# Altium footprint library Package_DFN_QFN.PcbLib: 735 footprints (part 27 of 46)
Each footprint in its own frame and in the unit in brackets; x right, y up, seen from the top. Pads: shape width x height; smd on the part's side, far side on the other; paste and mask are expansions set on the pad; w line width, h text height; cw(c..) or ccw(c..) is an arc to the next point about the centre after c.
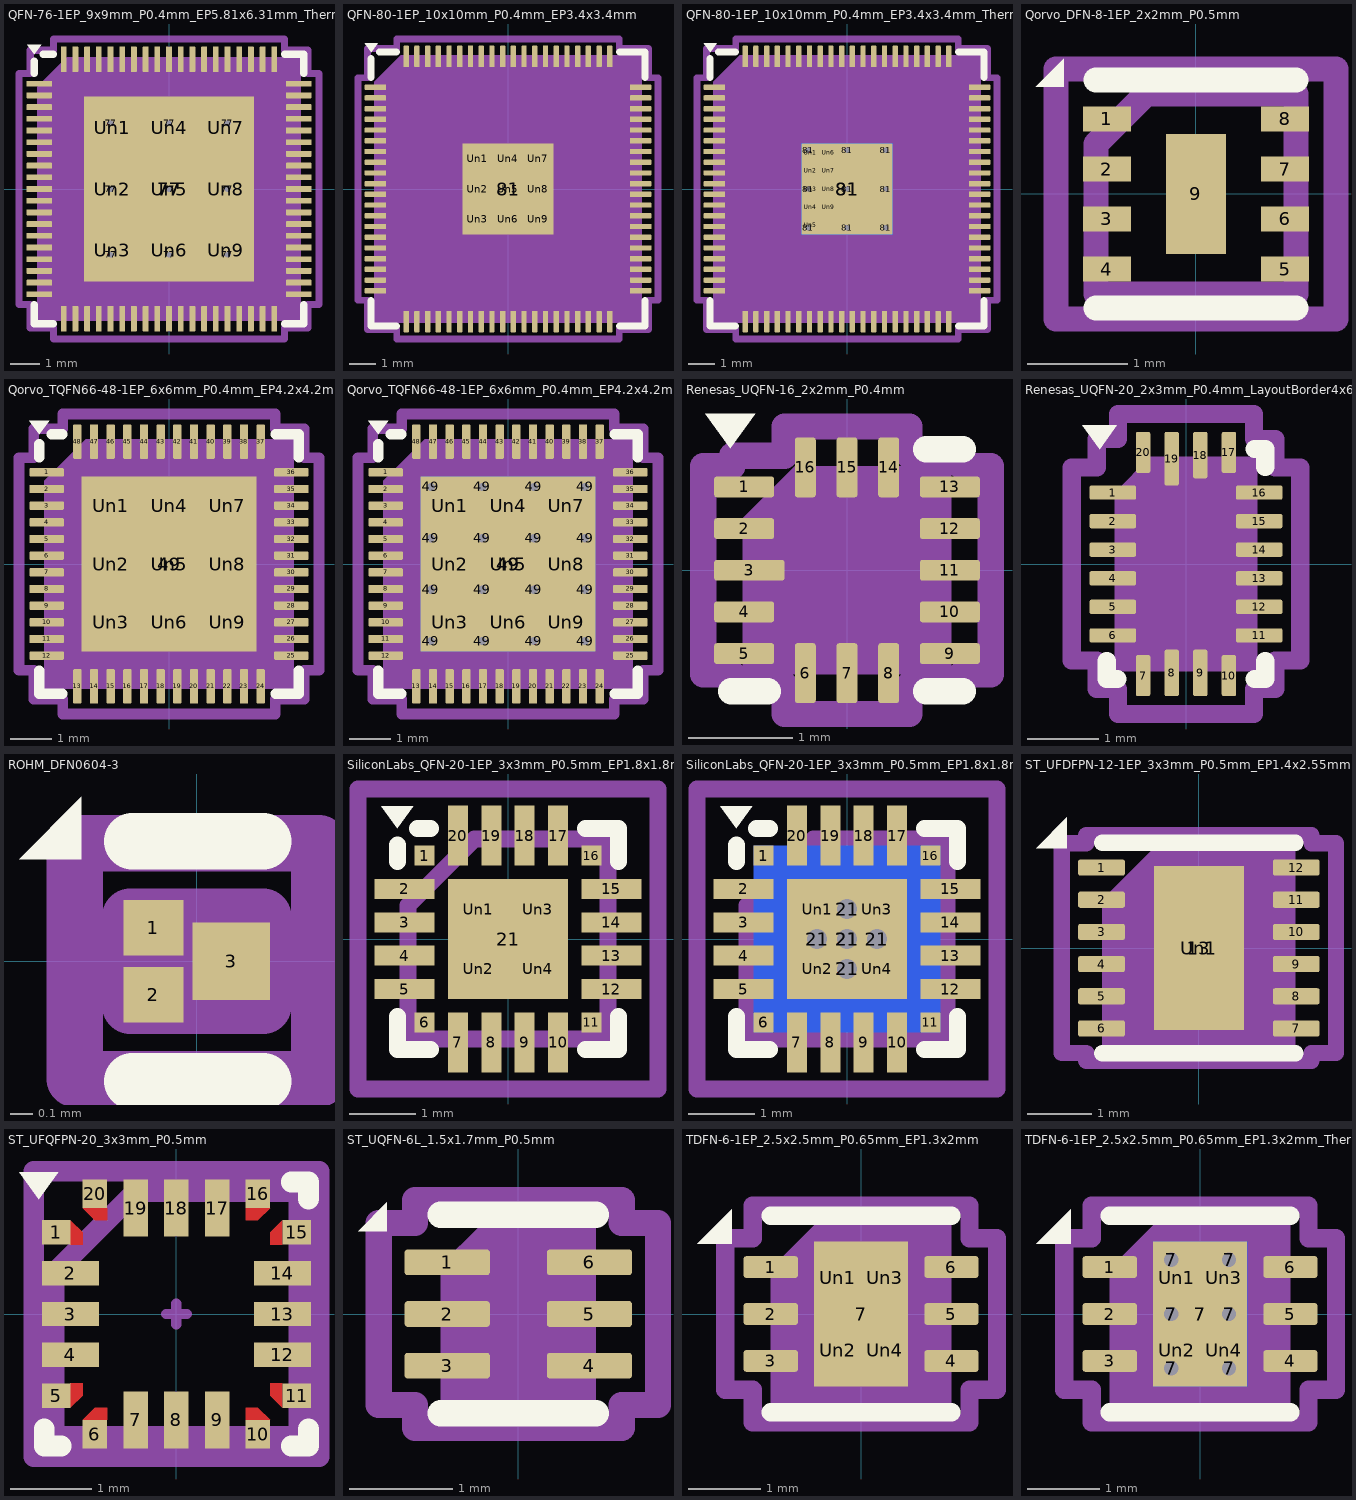
[diagram p26: the footprints below, top view; thin cyan lines are the x and y axes]

## QFN-76-1EP_9x9mm_P0.4mm_EP5.81x6.31mm_ThermalVias [mm] "QFN-76-1EP_9x9mm_P0.4mm_EP5.81x6.31mm_ThermalVias"
pads (96):
  rrect25% 0.875x0.2 smd: 1(-4.437,3.6) 2(-4.437,3.2) 3(-4.437,2.8) 4(-4.437,2.4) 5(-4.437,2) 6(-4.437,1.6) 7(-4.437,1.2) 8(-4.437,0.8) 9(-4.437,0.4) 10(-4.437,0) 11(-4.437,-0.4) 12(-4.437,-0.8) 13(-4.437,-1.2) 14(-4.437,-1.6) 15(-4.437,-2) 16(-4.437,-2.4) 17(-4.437,-2.8) 18(-4.437,-3.2) 19(-4.437,-3.6) 39(4.437,-3.6) 40(4.437,-3.2) 41(4.437,-2.8) 42(4.437,-2.4) 43(4.437,-2) 44(4.437,-1.6) 45(4.437,-1.2) 46(4.437,-0.8) 47(4.437,-0.4) 48(4.437,0) 49(4.437,0.4) 50(4.437,0.8) 51(4.437,1.2) 52(4.437,1.6) 53(4.437,2) 54(4.437,2.4) 55(4.437,2.8) 56(4.437,3.2) 57(4.437,3.6)
  rrect25% 0.2x0.875 smd: 20(-3.6,-4.437) 21(-3.2,-4.437) 22(-2.8,-4.437) 23(-2.4,-4.437) 24(-2,-4.437) 25(-1.6,-4.437) 26(-1.2,-4.437) 27(-0.8,-4.437) 28(-0.4,-4.437) 29(0,-4.437) 30(0.4,-4.437) 31(0.8,-4.437) 32(1.2,-4.437) 33(1.6,-4.437) 34(2,-4.437) 35(2.4,-4.437) 36(2.8,-4.437) 37(3.2,-4.437) 38(3.6,-4.437) 58(3.6,4.437) 59(3.2,4.437) 60(2.8,4.437) 61(2.4,4.437) 62(2,4.437) 63(1.6,4.437) 64(1.2,4.437) 65(0.8,4.437) 66(0.4,4.437) 67(0,4.437) 68(-0.4,4.437) 69(-0.8,4.437) 70(-1.2,4.437) 71(-1.6,4.437) 72(-2,4.437) 73(-2.4,4.437) 74(-2.8,4.437) 75(-3.2,4.437) 76(-3.6,4.437)
  round 0.5 hole 0.2: 77(-2,-2.25) 77(-2,0) 77(-2,2.25) 77(0,-2.25) 77(0,0) 77(0,2.25) 77(2,-2.25) 77(2,0) 77(2,2.25)
  rect 5.81x6.31 smd: 77(0,0)
  rect 4.5x5 smd far side: 77(0,0)
  rrect16% 1.56x1.7 on Top Paste: Un1(-1.94,2.1) Un2(-1.94,0) Un3(-1.94,-2.1) Un4(0,2.1) Un5(0,0) Un6(0,-2.1) Un7(1.94,2.1) Un8(1.94,0) Un9(1.94,-2.1)
F.SilkS:
  region: -4.61,4.61 -4.85,4.94 -4.37,4.94
  lines w0.254: -4.61,-3.96 -4.61,-4.61 -3.96,-4.61 ; -4.61,3.96 -4.61,4.37 ; -4.31,4.61 -3.96,4.61 ; 3.96,-4.61 4.61,-4.61 4.61,-3.96 ; 3.96,4.61 4.61,4.61 4.61,3.96
Top Component Center:
  lines w0.127: -0.127,0 0.127,0 -0.127,0 ; 0,-0.127 0,0.127 0,-0.127
Top Assembly:
  region: 4.5,-4.5 -4.5,-4.5 -4.5,3.5 -3.5,4.5 4.5,4.5
Top Courtyard:
  lines w0.254: -5.13,-3.95 -5.13,3.95 -4.75,3.95 -4.75,4.75 -3.95,4.75 -3.95,5.13 3.95,5.13 3.95,4.75 4.75,4.75 4.75,3.95 5.13,3.95 5.13,-3.95 4.75,-3.95 4.75,-4.75 3.95,-4.75 3.95,-5.13 -3.95,-5.13 -3.95,-4.75 -4.75,-4.75 -4.75,-3.95 -5.13,-3.95
Top Designator:
  text ".Designator" at -3.43,-0.344 h1.52
3D body "QFN-76-1EP_9x9mm_P0.4mm_EP5.81x6.31mm.step": height 0.88, standoff 0, extent -4.5,-4.5 4.5,4.5

## QFN-80-1EP_10x10mm_P0.4mm_EP3.4x3.4mm [mm] "QFN-80-1EP_10x10mm_P0.4mm_EP3.4x3.4mm"
pads (90):
  rrect25% 0.8x0.2 smd: 1(-4.95,3.8) 2(-4.95,3.4) 3(-4.95,3) 4(-4.95,2.6) 5(-4.95,2.2) 6(-4.95,1.8) 7(-4.95,1.4) 8(-4.95,1) 9(-4.95,0.6) 10(-4.95,0.2) 11(-4.95,-0.2) 12(-4.95,-0.6) 13(-4.95,-1) 14(-4.95,-1.4) 15(-4.95,-1.8) 16(-4.95,-2.2) 17(-4.95,-2.6) 18(-4.95,-3) 19(-4.95,-3.4) 20(-4.95,-3.8) 41(4.95,-3.8) 42(4.95,-3.4) 43(4.95,-3) 44(4.95,-2.6) 45(4.95,-2.2) 46(4.95,-1.8) 47(4.95,-1.4) 48(4.95,-1) 49(4.95,-0.6) 50(4.95,-0.2) 51(4.95,0.2) 52(4.95,0.6) 53(4.95,1) 54(4.95,1.4) 55(4.95,1.8) 56(4.95,2.2) 57(4.95,2.6) 58(4.95,3) 59(4.95,3.4) 60(4.95,3.8)
  rrect25% 0.2x0.8 smd: 21(-3.8,-4.95) 22(-3.4,-4.95) 23(-3,-4.95) 24(-2.6,-4.95) 25(-2.2,-4.95) 26(-1.8,-4.95) 27(-1.4,-4.95) 28(-1,-4.95) 29(-0.6,-4.95) 30(-0.2,-4.95) 31(0.2,-4.95) 32(0.6,-4.95) 33(1,-4.95) 34(1.4,-4.95) 35(1.8,-4.95) 36(2.2,-4.95) 37(2.6,-4.95) 38(3,-4.95) 39(3.4,-4.95) 40(3.8,-4.95) 61(3.8,4.95) 62(3.4,4.95) 63(3,4.95) 64(2.6,4.95) 65(2.2,4.95) 66(1.8,4.95) 67(1.4,4.95) 68(1,4.95) 69(0.6,4.95) 70(0.2,4.95) 71(-0.2,4.95) 72(-0.6,4.95) 73(-1,4.95) 74(-1.4,4.95) 75(-1.8,4.95) 76(-2.2,4.95) 77(-2.6,4.95) 78(-3,4.95) 79(-3.4,4.95) 80(-3.8,4.95)
  rect 3.4x3.4 smd: 81(0,0)
  rrect25% 0.91x0.91 on Top Paste: Un1(-1.13,1.13) Un2(-1.13,0) Un3(-1.13,-1.13) Un4(0,1.13) Un5(0,0) Un6(0,-1.13) Un7(1.13,1.13) Un8(1.13,0) Un9(1.13,-1.13)
F.SilkS:
  region: -5.11,5.11 -5.35,5.44 -4.87,5.44
  lines w0.254: -5.11,-4.16 -5.11,-5.11 -4.16,-5.11 ; -5.11,4.16 -5.11,4.87 ; -4.81,5.11 -4.16,5.11 ; 4.16,-5.11 5.11,-5.11 5.11,-4.16 ; 4.16,5.11 5.11,5.11 5.11,4.16
Top Component Center:
  lines w0.127: -0.127,0 0.127,0 -0.127,0 ; 0,-0.127 0,0.127 0,-0.127
Top Assembly:
  region: 5,-5 -5,-5 -5,4 -4,5 5,5
Top Courtyard:
  lines w0.254: -5.6,-4.15 -5.6,4.15 -5.25,4.15 -5.25,5.25 -4.15,5.25 -4.15,5.6 4.15,5.6 4.15,5.25 5.25,5.25 5.25,4.15 5.6,4.15 5.6,-4.15 5.25,-4.15 5.25,-5.25 4.15,-5.25 4.15,-5.6 -4.15,-5.6 -4.15,-5.25 -5.25,-5.25 -5.25,-4.15 -5.6,-4.15
Top Designator:
  text ".Designator" at -3.43,-0.344 h1.52

## QFN-80-1EP_10x10mm_P0.4mm_EP3.4x3.4mm_ThermalVias [mm] "QFN-80-1EP_10x10mm_P0.4mm_EP3.4x3.4mm_ThermalVias"
pads (116):
  rrect25% 0.8x0.2 smd: 1(-4.95,3.8) 2(-4.95,3.4) 3(-4.95,3) 4(-4.95,2.6) 5(-4.95,2.2) 6(-4.95,1.8) 7(-4.95,1.4) 8(-4.95,1) 9(-4.95,0.6) 10(-4.95,0.2) 11(-4.95,-0.2) 12(-4.95,-0.6) 13(-4.95,-1) 14(-4.95,-1.4) 15(-4.95,-1.8) 16(-4.95,-2.2) 17(-4.95,-2.6) 18(-4.95,-3) 19(-4.95,-3.4) 20(-4.95,-3.8) 41(4.95,-3.8) 42(4.95,-3.4) 43(4.95,-3) 44(4.95,-2.6) 45(4.95,-2.2) 46(4.95,-1.8) 47(4.95,-1.4) 48(4.95,-1) 49(4.95,-0.6) 50(4.95,-0.2) 51(4.95,0.2) 52(4.95,0.6) 53(4.95,1) 54(4.95,1.4) 55(4.95,1.8) 56(4.95,2.2) 57(4.95,2.6) 58(4.95,3) 59(4.95,3.4) 60(4.95,3.8)
  rrect25% 0.2x0.8 smd: 21(-3.8,-4.95) 22(-3.4,-4.95) 23(-3,-4.95) 24(-2.6,-4.95) 25(-2.2,-4.95) 26(-1.8,-4.95) 27(-1.4,-4.95) 28(-1,-4.95) 29(-0.6,-4.95) 30(-0.2,-4.95) 31(0.2,-4.95) 32(0.6,-4.95) 33(1,-4.95) 34(1.4,-4.95) 35(1.8,-4.95) 36(2.2,-4.95) 37(2.6,-4.95) 38(3,-4.95) 39(3.4,-4.95) 40(3.8,-4.95) 61(3.8,4.95) 62(3.4,4.95) 63(3,4.95) 64(2.6,4.95) 65(2.2,4.95) 66(1.8,4.95) 67(1.4,4.95) 68(1,4.95) 69(0.6,4.95) 70(0.2,4.95) 71(-0.2,4.95) 72(-0.6,4.95) 73(-1,4.95) 74(-1.4,4.95) 75(-1.8,4.95) 76(-2.2,4.95) 77(-2.6,4.95) 78(-3,4.95) 79(-3.4,4.95) 80(-3.8,4.95)
  round 0.5 hole 0.2: 81(-1.45,-1.45) 81(-1.45,0) 81(-1.45,1.45) 81(0,-1.45) 81(0,0) 81(0,1.45) 81(1.45,-1.45) 81(1.45,0) 81(1.45,1.45)
  rect 3.4x3.4 smd: 81(0,0)
  rect 3.4x3.4 smd far side: 81(0,0)
  rrect25% 0.53x0.53 on Top Paste: Un1(-1.36,1.36) Un2(-1.36,0.68) Un3(-1.36,0) Un4(-1.36,-0.68) Un5(-1.36,-1.36) Un6(-0.68,1.36) Un7(-0.68,0.68) Un8(-0.68,0) Un9(-0.68,-0.68) Un10(-0.68,-1.36) Un11(0,1.36) Un12(0,0.68) Un13(0,0) Un14(0,-0.68) Un15(0,-1.36) Un16(0.68,1.36) Un17(0.68,0.68) Un18(0.68,0) Un19(0.68,-0.68) Un20(0.68,-1.36) Un21(1.36,1.36) Un22(1.36,0.68) Un23(1.36,0) Un24(1.36,-0.68) Un25(1.36,-1.36)
F.SilkS:
  region: -5.11,5.11 -5.35,5.44 -4.87,5.44
  lines w0.254: -5.11,-4.16 -5.11,-5.11 -4.16,-5.11 ; -5.11,4.16 -5.11,4.87 ; -4.81,5.11 -4.16,5.11 ; 4.16,-5.11 5.11,-5.11 5.11,-4.16 ; 4.16,5.11 5.11,5.11 5.11,4.16
Top Component Center:
  lines w0.127: -0.127,0 0.127,0 -0.127,0 ; 0,-0.127 0,0.127 0,-0.127
Top Assembly:
  region: 5,-5 -5,-5 -5,4 -4,5 5,5
Top Courtyard:
  lines w0.254: -5.6,-4.15 -5.6,4.15 -5.25,4.15 -5.25,5.25 -4.15,5.25 -4.15,5.6 4.15,5.6 4.15,5.25 5.25,5.25 5.25,4.15 5.6,4.15 5.6,-4.15 5.25,-4.15 5.25,-5.25 4.15,-5.25 4.15,-5.6 -4.15,-5.6 -4.15,-5.25 -5.25,-5.25 -5.25,-4.15 -5.6,-4.15
Top Designator:
  text ".Designator" at -3.43,-0.344 h1.52

## Qorvo_DFN-8-1EP_2x2mm_P0.5mm [mm] "Qorvo_DFN-8-1EP_2x2mm_P0.5mm"
pads (9):
  rect 0.48x0.25 smd: 1(-0.89,0.75) 2(-0.89,0.25) 3(-0.89,-0.25) 4(-0.89,-0.75) 5(0.89,-0.75) 6(0.89,-0.25) 7(0.89,0.25) 8(0.89,0.75)
  rect 0.6x1.2 smd: 9(0,0)
F.SilkS:
  region: -1.32,1.07 -1.6,1.07 -1.32,1.35
  lines w0.254: -1,-1.14 1,-1.14 ; -1,1.14 1,1.14
Top Component Center:
  lines w0.127: -0.127,0 0.127,0 -0.127,0 ; 0,-0.127 0,0.127 0,-0.127
Top Assembly:
  lines w0.254: -1,-1 -1,0.5 -0.5,1 1,1 1,-1 -1,-1
Top Courtyard:
  lines w0.254: -1.4,-1.25 -1.4,1.25 1.4,1.25 1.4,-1.25 -1.4,-1.25
Top Designator:
  text ".Designator" at -2.251,-0.226 h1

## Qorvo_TQFN66-48-1EP_6x6mm_P0.4mm_EP4.2x4.2mm [mm] "Qorvo_TQFN66-48-1EP_6x6mm_P0.4mm_EP4.2x4.2mm"
pads (58):
  rrect25% 0.825x0.2 smd: 1(-2.937,2.2) 2(-2.937,1.8) 3(-2.937,1.4) 4(-2.937,1) 5(-2.937,0.6) 6(-2.937,0.2) 7(-2.937,-0.2) 8(-2.937,-0.6) 9(-2.937,-1) 10(-2.937,-1.4) 11(-2.937,-1.8) 12(-2.937,-2.2) 25(2.937,-2.2) 26(2.937,-1.8) 27(2.937,-1.4) 28(2.937,-1) 29(2.937,-0.6) 30(2.937,-0.2) 31(2.937,0.2) 32(2.937,0.6) 33(2.937,1) 34(2.937,1.4) 35(2.937,1.8) 36(2.937,2.2)
  rrect25% 0.2x0.825 smd: 13(-2.2,-2.937) 14(-1.8,-2.937) 15(-1.4,-2.937) 16(-1,-2.937) 17(-0.6,-2.937) 18(-0.2,-2.937) 19(0.2,-2.937) 20(0.6,-2.937) 21(1,-2.937) 22(1.4,-2.937) 23(1.8,-2.937) 24(2.2,-2.937) 37(2.2,2.937) 38(1.8,2.937) 39(1.4,2.937) 40(1,2.937) 41(0.6,2.937) 42(0.2,2.937) 43(-0.2,2.937) 44(-0.6,2.937) 45(-1,2.937) 46(-1.4,2.937) 47(-1.8,2.937) 48(-2.2,2.937)
  rect 4.2x4.2 smd: 49(0,0)
  rrect22% 1.13x1.13 on Top Paste: Un1(-1.4,1.4) Un2(-1.4,0) Un3(-1.4,-1.4) Un4(0,1.4) Un5(0,0) Un6(0,-1.4) Un7(1.4,1.4) Un8(1.4,0) Un9(1.4,-1.4)
F.SilkS:
  region: -3.11,3.11 -3.35,3.44 -2.87,3.44
  lines w0.254: -3.11,-2.56 -3.11,-3.11 -2.56,-3.11 ; -3.11,2.56 -3.11,2.87 ; -2.81,3.11 -2.56,3.11 ; 2.56,-3.11 3.11,-3.11 3.11,-2.56 ; 2.56,3.11 3.11,3.11 3.11,2.56
Top Component Center:
  lines w0.127: -0.127,0 0.127,0 -0.127,0 ; 0,-0.127 0,0.127 0,-0.127
Top Assembly:
  region: 3,-3 -3,-3 -3,2 -2,3 3,3
Top Courtyard:
  lines w0.254: -3.6,-2.55 -3.25,-2.55 -3.25,-3.25 -2.55,-3.25 -2.55,-3.6 2.55,-3.6 2.55,-3.25 3.25,-3.25 3.25,-2.55 3.6,-2.55 3.6,2.55 3.25,2.55 3.25,3.25 2.55,3.25 2.55,3.6 -2.55,3.6 -2.55,3.25 -3.25,3.25 -3.25,2.55 -3.6,2.55 -3.6,-2.55
Top Designator:
  text ".Designator" at -3.43,-0.344 h1.52
3D body "Qorvo_TQFN66-48-1EP_6x6mm_P0.4mm_EP4.2x4.2mm.step": height 0.78, standoff 0, extent -3,-3 3,3

## Qorvo_TQFN66-48-1EP_6x6mm_P0.4mm_EP4.2x4.2mm_ThermalVias [mm] "Qorvo_TQFN66-48-1EP_6x6mm_P0.4mm_EP4.2x4.2mm_ThermalVias"
pads (75):
  rrect25% 0.825x0.2 smd: 1(-2.937,2.2) 2(-2.937,1.8) 3(-2.937,1.4) 4(-2.937,1) 5(-2.937,0.6) 6(-2.937,0.2) 7(-2.937,-0.2) 8(-2.937,-0.6) 9(-2.937,-1) 10(-2.937,-1.4) 11(-2.937,-1.8) 12(-2.937,-2.2) 25(2.937,-2.2) 26(2.937,-1.8) 27(2.937,-1.4) 28(2.937,-1) 29(2.937,-0.6) 30(2.937,-0.2) 31(2.937,0.2) 32(2.937,0.6) 33(2.937,1) 34(2.937,1.4) 35(2.937,1.8) 36(2.937,2.2)
  rrect25% 0.2x0.825 smd: 13(-2.2,-2.937) 14(-1.8,-2.937) 15(-1.4,-2.937) 16(-1,-2.937) 17(-0.6,-2.937) 18(-0.2,-2.937) 19(0.2,-2.937) 20(0.6,-2.937) 21(1,-2.937) 22(1.4,-2.937) 23(1.8,-2.937) 24(2.2,-2.937) 37(2.2,2.937) 38(1.8,2.937) 39(1.4,2.937) 40(1,2.937) 41(0.6,2.937) 42(0.2,2.937) 43(-0.2,2.937) 44(-0.6,2.937) 45(-1,2.937) 46(-1.4,2.937) 47(-1.8,2.937) 48(-2.2,2.937)
  round 0.5 hole 0.2: 49(-1.85,-1.85) 49(-1.85,-0.617) 49(-1.85,0.617) 49(-1.85,1.85) 49(-0.617,-1.85) 49(-0.617,-0.617) 49(-0.617,0.617) 49(-0.617,1.85) 49(0.617,-1.85) 49(0.617,-0.617) 49(0.617,0.617) 49(0.617,1.85) 49(1.85,-1.85) 49(1.85,-0.617) 49(1.85,0.617) 49(1.85,1.85)
  rect 4.2x4.2 smd: 49(0,0)
  rect 4.2x4.2 smd far side: 49(0,0)
  rrect23% 1.08x1.08 on Top Paste: Un1(-1.4,1.4) Un2(-1.4,0) Un3(-1.4,-1.4) Un4(0,1.4) Un5(0,0) Un6(0,-1.4) Un7(1.4,1.4) Un8(1.4,0) Un9(1.4,-1.4)
F.SilkS:
  region: -3.11,3.11 -3.35,3.44 -2.87,3.44
  lines w0.254: -3.11,-2.56 -3.11,-3.11 -2.56,-3.11 ; -3.11,2.56 -3.11,2.87 ; -2.81,3.11 -2.56,3.11 ; 2.56,-3.11 3.11,-3.11 3.11,-2.56 ; 2.56,3.11 3.11,3.11 3.11,2.56
Top Component Center:
  lines w0.127: -0.127,0 0.127,0 -0.127,0 ; 0,-0.127 0,0.127 0,-0.127
Top Assembly:
  region: 3,-3 -3,-3 -3,2 -2,3 3,3
Top Courtyard:
  lines w0.254: -3.6,-2.55 -3.25,-2.55 -3.25,-3.25 -2.55,-3.25 -2.55,-3.6 2.55,-3.6 2.55,-3.25 3.25,-3.25 3.25,-2.55 3.6,-2.55 3.6,2.55 3.25,2.55 3.25,3.25 2.55,3.25 2.55,3.6 -2.55,3.6 -2.55,3.25 -3.25,3.25 -3.25,2.55 -3.6,2.55 -3.6,-2.55
Top Designator:
  text ".Designator" at -3.43,-0.344 h1.52
3D body "Qorvo_TQFN66-48-1EP_6x6mm_P0.4mm_EP4.2x4.2mm.step": height 0.78, standoff 0, extent -3,-3 3,3

## Renesas_UQFN-16_2x2mm_P0.4mm [mm] "Renesas_UQFN-16_2x2mm_P0.4mm"
pads (16):
  rrect25% 0.575x0.2 smd: 1(-0.988,0.8) 2(-0.988,0.4) 4(-0.988,-0.4) 5(-0.988,-0.8) 9(0.988,-0.8) 10(0.988,-0.4) 11(0.988,0) 12(0.988,0.4) 13(0.988,0.8)
  rrect25% 0.675x0.2 smd: 3(-0.937,0)
  rrect25% 0.2x0.575 smd: 6(-0.4,-0.988) 7(0,-0.988) 8(0.4,-0.988) 14(0.4,0.988) 15(0,0.988) 16(-0.4,0.988)
F.SilkS:
  region: -1.12,1.17 -1.36,1.5 -0.88,1.5
  lines w0.254: -1.11,-1.16 -0.76,-1.16 ; 0.76,-1.16 1.11,-1.16 ; 0.76,1.16 1.11,1.16
Top Component Center:
  lines w0.127: -0.127,0 0.127,0 -0.127,0 ; 0,-0.127 0,0.127 0,-0.127
Top Assembly:
  region: 1,-1 -1,-1 -1,0.5 -0.5,1 1,1
Top Courtyard:
  lines w0.254: -1.38,-1 -1.38,1 -1.1,1 -1.1,1.1 -0.6,1.1 -0.6,1.38 0.6,1.38 0.6,1.1 1.1,1.1 1.1,1 1.38,1 1.38,-1 1.1,-1 1.1,-1.1 0.6,-1.1 0.6,-1.38 -0.6,-1.38 -0.6,-1.1 -1.1,-1.1 -1.1,-1 -1.38,-1
Top Designator:
  text ".Designator" at -2.251,-0.226 h1

## Renesas_UQFN-20_2x3mm_P0.4mm_LayoutBorder4x6y [mm] "Renesas_UQFN-20_2x3mm_P0.4mm_LayoutBorder4x6y"
pads (20):
  rrect25% 0.65x0.2 smd: 1(-1.025,1) 2(-1.025,0.6) 3(-1.025,0.2) 4(-1.025,-0.2) 5(-1.025,-0.6) 6(-1.025,-1) 11(1.025,-1) 12(1.025,-0.6) 13(1.025,-0.2) 14(1.025,0.2) 15(1.025,0.6) 16(1.025,1)
  rrect25% 0.2x0.575 smd: 7(-0.6,-1.562) 10(0.6,-1.562) 17(0.6,1.562) 20(-0.6,1.562)
  rrect25% 0.2x0.65 smd: 8(-0.2,-1.525) 9(0.2,-1.525) 18(0.2,1.525)
  rrect25% 0.2x0.75 smd: 19(-0.2,1.475)
F.SilkS:
  region: -1.21,1.61 -1.45,1.94 -0.97,1.94
  lines w0.254: -1.11,-1.36 -1.11,-1.61 -0.96,-1.61 ; 0.96,-1.61 1.11,-1.61 1.11,-1.36 ; 0.96,1.61 1.11,1.61 1.11,1.36
Top Component Center:
  lines w0.127: -0.127,0 0.127,0 -0.127,0 ; 0,-0.127 0,0.127 0,-0.127
Top Assembly:
  region: 1,-1.5 -1,-1.5 -1,1 -0.5,1.5 1,1.5
Top Courtyard:
  lines w0.254: -1.6,-1.35 -1.25,-1.35 -1.25,-1.75 -0.95,-1.75 -0.95,-2.1 0.95,-2.1 0.95,-1.75 1.25,-1.75 1.25,-1.35 1.6,-1.35 1.6,1.35 1.25,1.35 1.25,1.75 0.95,1.75 0.95,2.1 -0.95,2.1 -0.95,1.75 -1.25,1.75 -1.25,1.35 -1.6,1.35 -1.6,-1.35
Top Designator:
  text ".Designator" at -2.251,-0.226 h1

## ROHM_DFN0604-3 [mm] "ROHM_DFN0604-3"
pads (3):
  rect 0.27x0.25 smd: 1(-0.195,0.15) 2(-0.195,-0.15)
  rect 0.35x0.35 smd: 3(0.155,0)
F.SilkS:
  region: -0.52,0.46 -0.8,0.46 -0.52,0.74
  lines w0.254: -0.29,-0.54 0.3,-0.54 ; -0.29,0.54 0.3,0.54
Top Component Center:
  lines w0.127: -0.127,0 0.127,0 -0.127,0 ; 0,-0.127 0,0.127 0,-0.127
Top Assembly:
  lines w0.254: -0.3,-0.2 0.3,-0.2 0.3,0.2 -0.3,0.2 -0.3,-0.2
Top Courtyard:
  lines w0.254: -0.55,-0.53 0.55,-0.53 0.55,0.53 -0.55,0.53 -0.55,-0.53
Top Designator:
  text ".Designator" at -1.69,-0.17 h0.75

## SiliconLabs_QFN-20-1EP_3x3mm_P0.5mm_EP1.8x1.8mm [mm] "SiliconLabs_QFN-20-1EP_3x3mm_P0.5mm_EP1.8x1.8mm"
pads (25):
  rect 0.3x0.3 smd: 1(-1.25,1.25) 6(-1.25,-1.25) 11(1.25,-1.25) 16(1.25,1.25)
  rect 0.9x0.3 smd: 2(-1.55,0.75) 3(-1.55,0.25) 4(-1.55,-0.25) 5(-1.55,-0.75) 12(1.55,-0.75) 13(1.55,-0.25) 14(1.55,0.25) 15(1.55,0.75)
  rect 0.3x0.9 smd: 7(-0.75,-1.55) 8(-0.25,-1.55) 9(0.25,-1.55) 10(0.75,-1.55) 17(0.75,1.55) 18(0.25,1.55) 19(-0.25,1.55) 20(-0.75,1.55)
  rect 1.8x1.8 smd: 21(0,0)
  rect 0.54x0.54 on Top Paste: Un1(-0.45,0.45) Un2(-0.45,-0.45) Un3(0.45,0.45) Un4(0.45,-0.45)
F.SilkS:
  region: -1.66,1.66 -1.9,1.99 -1.42,1.99
  lines w0.254: -1.66,-1.16 -1.66,-1.66 -1.16,-1.66 ; -1.66,1.16 -1.66,1.41 ; -1.36,1.66 -1.16,1.66 ; 1.16,-1.66 1.66,-1.66 1.66,-1.16 ; 1.16,1.66 1.66,1.66 1.66,1.16
Top Component Center:
  lines w0.127: -0.127,0 0.127,0 -0.127,0 ; 0,-0.127 0,0.127 0,-0.127
Top Assembly:
  lines w0.254: -1.5,-1.5 -1.5,0.5 -0.5,1.5 1.5,1.5 1.5,-1.5 -1.5,-1.5
Top Courtyard:
  lines w0.254: -2.25,-2.25 -2.25,2.25 2.25,2.25 2.25,-2.25 -2.25,-2.25
Top Designator:
  text ".Designator" at -3.43,-0.344 h1.52

## SiliconLabs_QFN-20-1EP_3x3mm_P0.5mm_EP1.8x1.8mm_ThermalVias [mm] "SiliconLabs_QFN-20-1EP_3x3mm_P0.5mm_EP1.8x1.8mm_ThermalVias"
pads (31):
  rect 0.3x0.3 smd: 1(-1.25,1.25) 6(-1.25,-1.25) 11(1.25,-1.25) 16(1.25,1.25)
  rect 0.9x0.3 smd: 2(-1.55,0.75) 3(-1.55,0.25) 4(-1.55,-0.25) 5(-1.55,-0.75) 12(1.55,-0.75) 13(1.55,-0.25) 14(1.55,0.25) 15(1.55,0.75)
  rect 0.3x0.9 smd: 7(-0.75,-1.55) 8(-0.25,-1.55) 9(0.25,-1.55) 10(0.75,-1.55) 17(0.75,1.55) 18(0.25,1.55) 19(-0.25,1.55) 20(-0.75,1.55)
  round 0.6 hole 0.3: 21(-0.45,0) 21(0,-0.45) 21(0,0) 21(0,0.45) 21(0.45,0)
  rect 1.8x1.8 smd: 21(0,0)
  rect 2.8x2.8 smd far side: 21(0,0)
  rect 0.54x0.54 on Top Paste: Un1(-0.45,0.45) Un2(-0.45,-0.45) Un3(0.45,0.45) Un4(0.45,-0.45)
F.SilkS:
  region: -1.66,1.66 -1.9,1.99 -1.42,1.99
  lines w0.254: -1.66,-1.16 -1.66,-1.66 -1.16,-1.66 ; -1.66,1.16 -1.66,1.41 ; -1.36,1.66 -1.16,1.66 ; 1.16,-1.66 1.66,-1.66 1.66,-1.16 ; 1.16,1.66 1.66,1.66 1.66,1.16
Top Component Center:
  lines w0.127: -0.127,0 0.127,0 -0.127,0 ; 0,-0.127 0,0.127 0,-0.127
Top Assembly:
  lines w0.254: -1.5,-1.5 -1.5,0.5 -0.5,1.5 1.5,1.5 1.5,-1.5 -1.5,-1.5
Top Courtyard:
  lines w0.254: -2.25,-2.25 -2.25,2.25 2.25,2.25 2.25,-2.25 -2.25,-2.25
Top Designator:
  text ".Designator" at -3.43,-0.344 h1.52

## ST_UFDFPN-12-1EP_3x3mm_P0.5mm_EP1.4x2.55mm [mm] "ST_UFDFPN-12-1EP_3x3mm_P0.5mm_EP1.4x2.55mm"
pads (14):
  rrect25% 0.725x0.25 smd: 1(-1.512,1.25) 2(-1.512,0.75) 3(-1.512,0.25) 4(-1.512,-0.25) 5(-1.512,-0.75) 6(-1.512,-1.25) 7(1.512,-1.25) 8(1.512,-0.75) 9(1.512,-0.25) 10(1.512,0.25) 11(1.512,0.75) 12(1.512,1.25)
  rect 1.4x2.55 smd: 13(0,0)
  rrect22% 1.13x2.06 on Top Paste: Un1(0,0)
F.SilkS:
  region: -2.05,1.55 -2.53,1.55 -2.05,2.03
  lines w0.254: -1.5,-1.635 1.5,-1.635 ; -1.5,1.635 1.5,1.635
Top Component Center:
  lines w0.127: -0.127,0 0.127,0 -0.127,0 ; 0,-0.127 0,0.127 0,-0.127
Top Assembly:
  region: 1.5,-1.5 -1.5,-1.5 -1.5,0.75 -0.75,1.5 1.5,1.5
Top Courtyard:
  lines w0.254: -2.13,-1.63 -1.75,-1.63 -1.75,-1.75 1.75,-1.75 1.75,-1.63 2.13,-1.63 2.13,1.63 1.75,1.63 1.75,1.75 -1.75,1.75 -1.75,1.63 -2.13,1.63 -2.13,-1.63
Top Designator:
  text ".Designator" at -3.43,-0.344 h1.52

## ST_UFQFPN-20_3x3mm_P0.5mm [mm] "ST_UFQFPN-20_3x3mm_P0.5mm"
pads (20):
  rect 0.35x0.3 smd: 1(-1.475,1) 5(-1.475,-1) 11(1.475,-1) 15(1.475,1)
  rect 0.7x0.3 smd: 2(-1.3,0.5) 3(-1.3,0) 4(-1.3,-0.5) 12(1.3,-0.5) 13(1.3,0) 14(1.3,0.5)
  rect 0.3x0.35 smd: 6(-1,-1.475) 10(1,-1.475) 16(1,1.475) 20(-1,1.475)
  rect 0.3x0.7 smd: 7(-0.5,-1.3) 8(0,-1.3) 9(0.5,-1.3) 17(0.5,1.3) 18(0,1.3) 19(-0.5,1.3)
F.Cu:
  region: -1.15,1 -1.15,0.85 -1.3,0.85 -1.3,1.15
  region: -1.15,-1 -1.3,-1.15 -1.3,-0.85 -1.15,-0.85
  region: -0.85,-1.3 -1.15,-1.3 -1,-1.15 -0.85,-1.15
  region: 1.15,-1.3 0.85,-1.3 0.85,-1.15 1,-1.15
  region: 1.3,-1.15 1.15,-1 1.15,-0.85 1.3,-0.85
  region: 1.3,0.85 1.15,0.85 1.15,1 1.3,1.15
  region: 1,1.15 0.85,1.15 0.85,1.3 1.15,1.3
  region: -0.85,1.15 -1,1.15 -1.15,1.3 -0.85,1.3
F.SilkS:
  region: -1.69,1.41 -1.93,1.74 -1.45,1.74
  lines w0.254: -1.62,-1.41 -1.62,-1.62 -1.41,-1.62 ; 1.41,-1.62 1.62,-1.62 1.62,-1.41 ; 1.41,1.62 1.62,1.62 1.62,1.41
F.Paste:
  region: -1.15,1 -1.15,0.85 -1.3,0.85 -1.3,1.15
  region: -1.15,-1 -1.3,-1.15 -1.3,-0.85 -1.15,-0.85
  region: -0.85,-1.3 -1.15,-1.3 -1,-1.15 -0.85,-1.15
  region: 1.15,-1.3 0.85,-1.3 0.85,-1.15 1,-1.15
  region: 1.3,-1.15 1.15,-1 1.15,-0.85 1.3,-0.85
  region: 1.3,0.85 1.15,0.85 1.15,1 1.3,1.15
  region: 1,1.15 0.85,1.15 0.85,1.3 1.15,1.3
  region: -0.85,1.15 -1,1.15 -1.15,1.3 -0.85,1.3
F.Mask:
  region: -1.15,1 -1.15,0.85 -1.3,0.85 -1.3,1.15
  region: -1.15,-1 -1.3,-1.15 -1.3,-0.85 -1.15,-0.85
  region: -0.85,-1.3 -1.15,-1.3 -1,-1.15 -0.85,-1.15
  region: 1.15,-1.3 0.85,-1.3 0.85,-1.15 1,-1.15
  region: 1.3,-1.15 1.15,-1 1.15,-0.85 1.3,-0.85
  region: 1.3,0.85 1.15,0.85 1.15,1 1.3,1.15
  region: 1,1.15 0.85,1.15 0.85,1.3 1.15,1.3
  region: -0.85,1.15 -1,1.15 -1.15,1.3 -0.85,1.3
Top Component Center:
  lines w0.127: -0.127,0 0.127,0 -0.127,0 ; 0,-0.127 0,0.127 0,-0.127
Top Assembly:
  lines w0.254: -1.5,-1.5 -1.5,0.5 -0.5,1.5 1.5,1.5 1.5,-1.5 -1.5,-1.5
Top Courtyard:
  lines w0.254: -1.75,-1.75 -1.75,1.75 1.75,1.75 1.75,-1.75 -1.75,-1.75
Top Designator:
  text ".Designator" at -3.43,-0.344 h1.52

## ST_UQFN-6L_1.5x1.7mm_P0.5mm [mm] "ST_UQFN-6L_1.5x1.7mm_P0.5mm"
pads (6):
  rrect25% 0.825x0.25 smd: 1(-0.687,0.5) 2(-0.687,0) 3(-0.687,-0.5) 4(0.687,-0.5) 5(0.687,0) 6(0.687,0.5)
F.SilkS:
  region: -1.27,0.8 -1.55,0.8 -1.27,1.08
  lines w0.254: -0.75,-0.96 0.75,-0.96 ; -0.75,0.96 0.75,0.96
Top Component Center:
  lines w0.127: -0.127,0 0.127,0 -0.127,0 ; 0,-0.127 0,0.127 0,-0.127
Top Assembly:
  region: 0.75,-0.85 -0.75,-0.85 -0.75,0.475 -0.375,0.85 0.75,0.85
Top Courtyard:
  lines w0.254: -1.35,-0.88 -1.35,0.88 -1,0.88 -1,1.1 1,1.1 1,0.88 1.35,0.88 1.35,-0.88 1,-0.88 1,-1.1 -1,-1.1 -1,-0.88 -1.35,-0.88
Top Designator:
  text ".Designator" at -2.251,-0.226 h1

## TDFN-6-1EP_2.5x2.5mm_P0.65mm_EP1.3x2mm [mm] "TDFN-6-1EP_2.5x2.5mm_P0.65mm_EP1.3x2mm"
pads (11):
  rrect25% 0.75x0.3 smd: 1(-1.25,0.65) 2(-1.25,0) 3(-1.25,-0.65) 4(1.25,-0.65) 5(1.25,0) 6(1.25,0.65)
  rect 1.3x2 smd: 7(0,0)
  rrect25% 0.52x0.81 on Top Paste: Un1(-0.325,0.5) Un2(-0.325,-0.5) Un3(0.325,0.5) Un4(0.325,-0.5)
F.SilkS:
  region: -1.79,0.97 -2.27,0.97 -1.79,1.45
  lines w0.254: -1.25,-1.36 1.25,-1.36 ; -1.25,1.36 1.25,1.36
Top Component Center:
  lines w0.127: -0.127,0 0.127,0 -0.127,0 ; 0,-0.127 0,0.127 0,-0.127
Top Assembly:
  region: 1.25,-1.25 -1.25,-1.25 -1.25,0.625 -0.625,1.25 1.25,1.25
Top Courtyard:
  lines w0.254: -1.88,-1.05 -1.88,1.05 -1.5,1.05 -1.5,1.5 1.5,1.5 1.5,1.05 1.88,1.05 1.88,-1.05 1.5,-1.05 1.5,-1.5 -1.5,-1.5 -1.5,-1.05 -1.88,-1.05
Top Designator:
  text ".Designator" at -3.43,-0.344 h1.52
3D body "TDFN-6-1EP_2.5x2.5mm_P0.65mm_EP1.3x2mm.step": height 0.85, standoff 0, extent -1.25,-1.225 1.25,1.225

## TDFN-6-1EP_2.5x2.5mm_P0.65mm_EP1.3x2mm_ThermalVias [mm] "TDFN-6-1EP_2.5x2.5mm_P0.65mm_EP1.3x2mm_ThermalVias"
pads (18):
  rrect25% 0.75x0.3 smd: 1(-1.25,0.65) 2(-1.25,0) 3(-1.25,-0.65) 4(1.25,-0.65) 5(1.25,0) 6(1.25,0.65)
  round 0.5 hole 0.2: 7(-0.4,-0.75) 7(-0.4,0) 7(-0.4,0.75) 7(0.4,-0.75) 7(0.4,0) 7(0.4,0.75)
  rect 1.3x2 smd: 7(0,0)
  rect 1.3x2 smd far side: 7(0,0)
  rrect25% 0.52x0.81 on Top Paste: Un1(-0.325,0.5) Un2(-0.325,-0.5) Un3(0.325,0.5) Un4(0.325,-0.5)
F.SilkS:
  region: -1.79,0.97 -2.27,0.97 -1.79,1.45
  lines w0.254: -1.25,-1.36 1.25,-1.36 ; -1.25,1.36 1.25,1.36
Top Component Center:
  lines w0.127: -0.127,0 0.127,0 -0.127,0 ; 0,-0.127 0,0.127 0,-0.127
Top Assembly:
  region: 1.25,-1.25 -1.25,-1.25 -1.25,0.625 -0.625,1.25 1.25,1.25
Top Courtyard:
  lines w0.254: -1.88,-1.05 -1.5,-1.05 -1.5,-1.5 1.5,-1.5 1.5,-1.05 1.88,-1.05 1.88,1.05 1.5,1.05 1.5,1.5 -1.5,1.5 -1.5,1.05 -1.88,1.05 -1.88,-1.05
Top Designator:
  text ".Designator" at -3.43,-0.344 h1.52
3D body "TDFN-6-1EP_2.5x2.5mm_P0.65mm_EP1.3x2mm.step": height 0.85, standoff 0, extent -1.25,-1.225 1.25,1.225